# Altium footprint library Module.PcbLib: 88 footprints (part 5 of 6)
Each footprint in its own frame and in the unit in brackets; x right, y up, seen from the top. Pads: shape width x height; smd on the part's side, far side on the other; paste and mask are expansions set on the pad; w line width, h text height; cw(c..) or ccw(c..) is an arc to the next point about the centre after c.
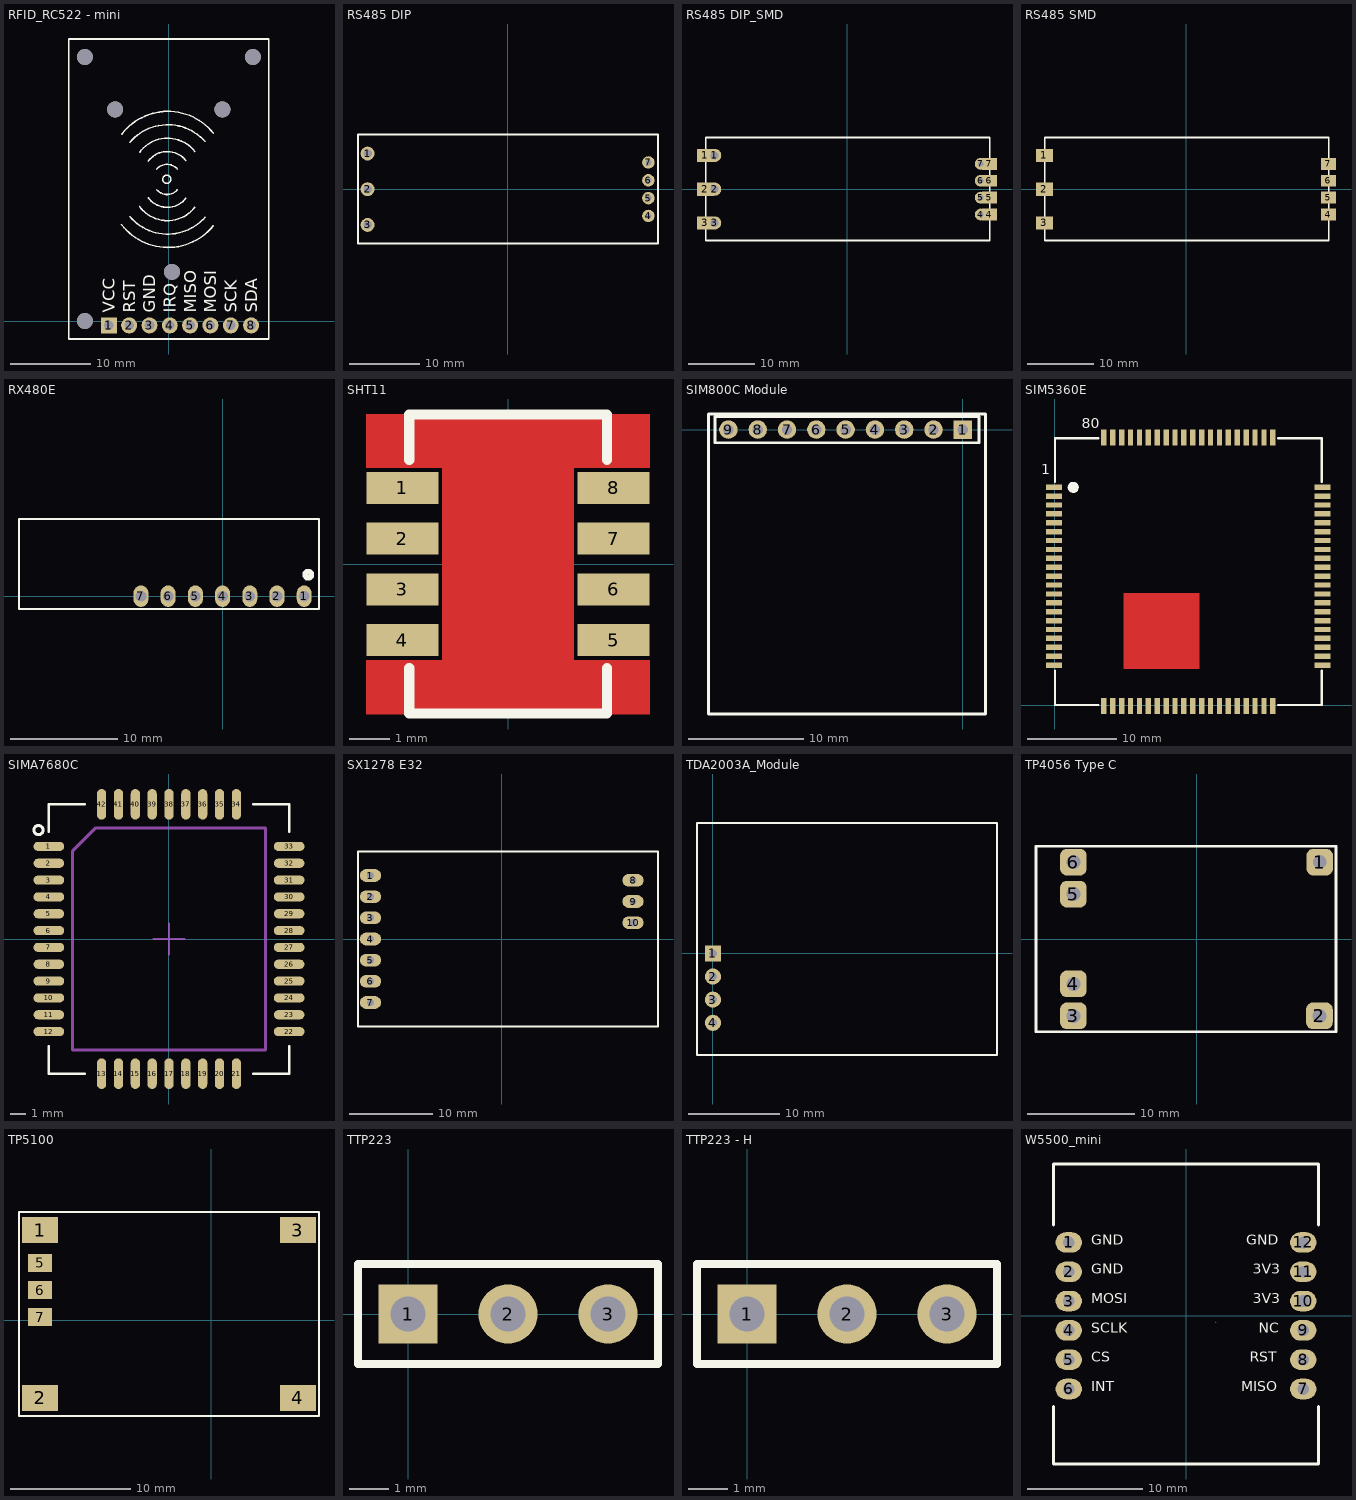
[diagram p4: the footprints below, top view; thin cyan lines are the x and y axes]

## RFID_RC522 - mini [mm] "RFID module header RC522 mini"
pads (14):
  rect 2x2 hole 1.2: 1(-7.46,-0.5)
  round 2 hole 1.2: 2(-4.92,-0.5) 3(-2.38,-0.5) 4(0.16,-0.5) 5(2.7,-0.5) 6(5.24,-0.5) 7(7.78,-0.5) 8(10.32,-0.5)
  round 2 hole 2: ""(-10.47,0.05) ""(-10.47,33.05) ""(-6.67,26.5) ""(0.43,6.2) ""(6.73,26.5) ""(10.53,33.05)
Top Overlay:
  circle w0.2: c-0.214,17.763 r0.508
  lines w0.2: -5.872,12.105 ccw(c-0.076,16.534) 5.599,11.95 ; -5.868,23.388 cw(c-0.072,18.959) 5.603,23.543 ; -4.824,13.095 ccw(c-0.092,17.123) 4.553,12.996 ; -4.819,22.397 cw(c-0.088,18.37) 4.557,22.497 ; -3.62,14.357 ccw(c-0.129,16.933) 3.288,14.261 ; -3.615,21.135 cw(c-0.125,18.559) 3.292,21.232 ; -2.527,15.45 ccw(c-0.156,17.217) 2.165,15.384 ; -2.523,20.043 cw(c-0.151,18.275) 2.169,20.109 ; -1.496,16.481 ccw(c-0.179,17.567) 1.106,16.442 ; -1.492,19.012 cw(c-0.174,17.925) 1.11,19.05 ; -12.47,-2.2 -12.47,35.3 12.53,35.3 12.53,-2.2 -12.47,-2.2
  text "VCC" at -6.716,1.056 h1.52
  text "RST" at -4.176,1.056 h1.52
  text "GND" at -1.636,1.056 h1.52
  text "IRQ" at 0.904,1.056 h1.52
  text "MISO" at 3.444,1.056 h1.52
  text "MOSI" at 5.984,1.056 h1.52
  text "SCK" at 8.524,1.056 h1.52
  text "SDA" at 11.064,1.056 h1.52
Top Designator:
  text ".Designator" at -3.681,16.206 h1.52
3D body "NFC-Reader.SLDPRT": height 5.6, standoff 4.4, extent -12.5,-2 12.5,35

## RS485 DIP [mil]
pads (7):
  round 78 hole 47: 1(-787.4,200) 2(-787.4,0) 3(-787.4,-200)
  round 70 hole 34: 4(787.4,-150) 5(787.4,-50) 6(787.4,50) 7(787.4,150)
Top Overlay:
  lines w10: -841.17,-303.88 841.6,-303.88 841.6,306.12 -841.17,306.12 -841.17,-303.88
Top Designator:
  text ".Designator" at -145.89,-12.43 h60
3D body "RS485.step": height 122.09, standoff 15.3, extent -841.17,-303 832.06,307.24
3D body: height 30.71, standoff 0, extent -841.17,-302.99 832.06,307.24

## RS485 DIP_SMD [mil]
pads (14):
  rect 100x78 smd: 1(-840.61,200) 2(-840.61,0) 3(-840.61,-200)
  round 78 hole 47: 1(-785.85,200) 2(-785.85,0) 3(-785.85,-200)
  round 70 hole 34: 4(788.96,-150) 5(788.96,-50) 6(788.96,50) 7(788.96,150)
  rect 90x70 smd: 4(840.61,-150) 5(840.61,-50) 6(840.61,50) 7(840.61,150)
Top Overlay:
  lines w10: -839.62,-303.88 -839.62,306.12 843.15,306.12 843.15,-303.88 -839.62,-303.88
Top Designator:
  text ".Designator" at -148.6,-12.43 h60
3D body: height 30.71, standoff 0, extent -839.61,-302.99 833.61,307.24
3D body "RS485.step": height 122.09, standoff 15.3, extent -839.62,-303 833.61,307.24

## RS485 SMD [mil]
pads (7):
  rect 100x78 smd: 1(-840.61,200) 2(-840.61,0) 3(-840.61,-200)
  rect 90x70 smd: 4(840.61,-150) 5(840.61,-50) 6(840.61,50) 7(840.61,150)
Top Overlay:
  lines w10: -839.62,-303.88 -839.62,306.12 843.15,306.12 843.15,-303.88 -839.62,-303.88
Top Designator:
  text ".Designator" at -148.6,-12.43 h60
3D body: height 30.71, standoff 0, extent -839.61,-302.99 833.61,307.24
3D body "RS485.step": height 122.09, standoff 15.3, extent -839.62,-303 833.61,307.24

## RX480E [mm]
pads (7):
  oval 1.4x2 hole 1 mask+0.1: 1(7.62,0) 2(5.08,0) 3(2.54,0) 4(0,0) 5(-2.54,0) 6(-5.08,0) 7(-7.62,0)
Top Overlay:
  circle w0.5: c8,2 r0.3
  lines w0.2: -19,-1.2 9,-1.2 9,7.2 -19,7.2 -19,-1.2
Top Designator:
  text ".Designator" at -8.711,3.023 h1.52
3D body "PLS-1R.step": height 3.3, standoff -5.32, extent -8.89,-0.415 -6.35,8.035
3D body "PLS-1R.step": height 3.3, standoff -5.32, extent -6.35,-0.415 -3.81,8.035
3D body "PLS-1R.step": height 3.3, standoff -5.32, extent -3.81,-0.415 -1.27,8.035
3D body "PLS-1R.step": height 3.3, standoff -5.32, extent -1.27,-0.415 1.27,8.035
3D body "PLS-1R.step": height 3.3, standoff -5.32, extent 1.27,-0.415 3.81,8.035
3D body "PLS-1R.step": height 3.3, standoff -5.32, extent 3.81,-0.415 6.35,8.035
3D body "PLS-1R.step": height 3.3, standoff -5.32, extent 6.35,-0.415 8.89,8.035
3D body "RX480E-4.STEP": height 13.05, standoff 0.75, extent -19,0.65 9,6.24

## SHT11 [mm]
pads (8):
  rect 1.8x0.8 smd mask+0.102: 1(-2.64,1.905) 2(-2.64,0.635) 3(-2.64,-0.635) 4(-2.64,-1.905) 5(2.64,-1.905) 6(2.64,-0.635) 7(2.64,0.635) 8(2.64,1.905)
Top Layer:
  pour cut-out: -3.54,3.75 3.54,3.75 3.54,2.407 3.539,2.409 1.64,2.409 1.639,2.408 1.639,-2.407 3.54,-2.407 3.54,-3.75 -3.54,-3.75 -3.543,-3.747 -3.543,-2.41 -1.643,-2.41 -1.64,-2.407 -1.64,2.41 -3.538,2.41 -3.539,2.411
Top Overlay:
  lines w0.254: -2.47,-2.599 -2.47,-3.735 2.47,-3.735 2.47,-2.599 ; -2.47,2.599 -2.47,3.735 2.47,3.735 2.47,2.599
Top Designator:
  text ".Designator" at -3.711,-0.344 h1.52

## SIM800C Module [mm]
pads (9):
  rect 1.6x1.6 hole 0.9: 1(0,0)
  round 1.6 hole 0.9: 2(-2.54,0) 3(-5.08,0) 4(-7.62,0) 5(-10.16,0) 6(-12.7,0) 7(-15.24,0) 8(-17.78,0) 9(-20.32,0)
Top Overlay:
  lines w0.254: -22.042,-24.651 1.959,-24.651 1.959,1.349 -22.042,1.349 -22.042,-24.651 ; -21.463,-1.143 1.38,-1.143 1.38,1.143 -21.463,1.143 -21.463,-1.143
Top Designator:
  text ".Designator" at -13.752,-11.995 h1.52
3D body "HEADER 2.54X9.stp": height 13, standoff 1.8, extent -21.463,-1.235 1.397,1.263
3D body "User Library-SIM800C-1.STEP": height 13.97, standoff 11.63, extent -18.87,-17.883 -1.27,-2.183
3D body "Header-F-2.54X9.stp": height 8.6, standoff -3.1, extent -21.715,-1.24 1.395,1.26
3D body: height 11.6, standoff 10, extent -22.098,-24.651 2.032,1.27

## SIM5360E [mm]
pads (82):
  rect 1.8x0.6 smd mask+0.102: 1(-0.1,24.5) 2(-0.1,23.5) 3(-0.1,22.5) 4(-0.1,21.5) 5(-0.1,20.5) 6(-0.1,19.5) 7(-0.1,18.5) 8(-0.1,17.5) 9(-0.1,16.5) 10(-0.1,15.5) 11(-0.1,14.5) 12(-0.1,13.5) 13(-0.1,12.5) 14(-0.1,11.5) 15(-0.1,10.5) 16(-0.1,9.5) 17(-0.1,8.5) 18(-0.1,7.5) 19(-0.1,6.5) 20(-0.1,5.5) 41(30.1,5.5) 42(30.1,6.5) 43(30.1,7.5) 44(30.1,8.5) 45(30.1,9.5) 46(30.1,10.5) 47(30.1,11.5) 48(30.1,12.5) 49(30.1,13.5) 50(30.1,14.5) 51(30.1,15.5) 52(30.1,16.5) 53(30.1,17.5) 54(30.1,18.5) 55(30.1,19.5) 56(30.1,20.5) 57(30.1,21.5) 58(30.1,22.5) 59(30.1,23.5) 60(30.1,24.5) 81(-0.1,4.5) 82(30.1,4.5)
  rect 0.6x1.8 smd mask+0.102: 21(5.5,-0.1) 22(6.5,-0.1) 23(7.5,-0.1) 24(8.5,-0.1) 25(9.5,-0.1) 26(10.5,-0.1) 27(11.5,-0.1) 28(12.5,-0.1) 29(13.5,-0.1) 30(14.5,-0.1) 31(15.5,-0.1) 32(16.5,-0.1) 33(17.5,-0.1) 34(18.5,-0.1) 35(19.5,-0.1) 36(20.5,-0.1) 37(21.5,-0.1) 38(22.5,-0.1) 39(23.5,-0.1) 40(24.5,-0.1) 61(24.5,30.1) 62(23.5,30.1) 63(22.5,30.1) 64(21.5,30.1) 65(20.5,30.1) 66(19.5,30.1) 67(18.5,30.1) 68(17.5,30.1) 69(16.5,30.1) 70(15.5,30.1) 71(14.5,30.1) 72(13.5,30.1) 73(12.5,30.1) 74(11.5,30.1) 75(10.5,30.1) 76(9.5,30.1) 77(8.5,30.1) 78(7.5,30.1) 79(6.5,30.1) 80(5.5,30.1)
Top Layer:
  pour cut-out: 7.75,12.6 16.25,12.6 16.25,4.1 7.75,4.1
Top Overlay:
  circle w0.254: c2.057,24.486 r0.5
  region: 2.057,23.986 1.958,23.986 1.774,24.062 1.634,24.202 1.557,24.386 1.557,24.486 1.557,24.585 1.634,24.769 1.774,24.909 1.958,24.986 2.057,24.986 2.157,24.986 2.341,24.909 2.481,24.769 2.557,24.585 2.557,24.486 2.557,24.386 2.481,24.202 2.341,24.062 2.157,23.986
  lines w0.254: 0,3.9 0,0 4.9,0 ; 0,25.1 0,30 4.9,30 ; 25.1,0 30,0 30,3.9 ; 25.1,30 30,30 30,25.1
  text "1" at -1.525,25.552 h2
  text "80" at 2.997,30.732 h2
Top Designator:
  text ".Designator" at 11.077,15.116 h1.52
3D body "User Library-sim5360_as_pcba_181113.step": height 2.95, standoff 0.05, extent 0.013,-0.002 30.013,29.998

## SIMA7680C [mm]
pads (42):
  oval 2x0.6 smd: 1(-7.85,6.05) 2(-7.85,4.95) 3(-7.85,3.85) 4(-7.85,2.75) 5(-7.85,1.65) 6(-7.85,0.55) 7(-7.85,-0.55) 8(-7.85,-1.65) 9(-7.85,-2.75) 10(-7.85,-3.85) 11(-7.85,-4.95) 12(-7.85,-6.05) 22(7.85,-6.05) 23(7.85,-4.95) 24(7.85,-3.85) 25(7.85,-2.75) 26(7.85,-1.65) 27(7.85,-0.55) 28(7.85,0.55) 29(7.85,1.65) 30(7.85,2.75) 31(7.85,3.85) 32(7.85,4.95) 33(7.85,6.05)
  oval 0.6x2 smd: 13(-4.4,-8.8) 14(-3.3,-8.8) 15(-2.2,-8.8) 16(-1.1,-8.8) 17(0,-8.8) 18(1.1,-8.8) 19(2.2,-8.8) 20(3.3,-8.8) 21(4.4,-8.8) 34(4.4,8.8) 35(3.3,8.8) 36(2.2,8.8) 37(1.1,8.8) 38(0,8.8) 39(-1.1,8.8) 40(-2.2,8.8) 41(-3.3,8.8) 42(-4.4,8.8)
Top Overlay:
  circle w0.2: c-8.528,7.118 r0.3
  lines w0.15: -7.85,-7 -7.85,-8.8 -5.5,-8.8 ; -7.85,7 -7.85,8.8 -5.5,8.8 ; 5.5,-8.8 7.85,-8.8 7.85,-7 ; 5.5,8.8 7.85,8.8 7.85,7
Top Designator:
  text ".Designator" at -3.711,-0.344 h1.52
Mechanical 12:
  text ".Designator" at -4.869,-0.452 h2
Mechanical 13:
  lines w0.15: -1,0 1,0 ; 0,-1 0,1
Mechanical 15:
  lines w0.2: -6.315,-7.265 -6.315,5.73 -4.78,7.265 6.315,7.265 6.315,-7.265 -6.315,-7.265
3D body "User Library-SIM800C-2.STEP": height 3.11, standoff 0.01, extent -7.85,-8.8 7.85,8.8

## SX1278 E32 [mil]
pads (10):
  oval 100x60 hole 35: 1(-620.08,300) 2(-620.08,200) 3(-620.08,100) 4(-620.08,0) 5(-620.08,-100) 6(-620.08,-200) 7(-620.08,-300) 8(620.08,277.17) 9(620.08,177.17) 10(620.08,77.17)
Top Overlay:
  lines w10: -679.13,-413.39 738.19,-413.39 738.19,413.39 -679.13,413.39 -679.13,-413.39
Top Designator:
  text ".Designator" at 126.63,-13.55 h60
Mechanical 12:
  text ".Designator" at -287.52,-26.67 h118.11
3D body "E32-433T20DT.stp": height 476.19, standoff -60.03, extent -679.86,-414.39 1229.59,412.38
3D body "05_ HEADER-3WAY-1ROW-2.54MM-VERTICAL-PCB.SLDPRT": height 386.96, standoff -67.92, extent -670.08,-50 -570.08,250
3D body "HEADER-1WAY-1ROW-2.54MM-VERTICAL-PCB.SLDPRT": height 386.22, standoff -68.11, extent -670.07,250 -570.07,350
3D body "05_ HEADER-3WAY-1ROW-2.54MM-VERTICAL-PCB.SLDPRT": height 386.96, standoff -67.92, extent -670.08,-350 -570.08,-50
3D body "05_ HEADER-3WAY-1ROW-2.54MM-VERTICAL-PCB.SLDPRT": height 386.96, standoff -67.92, extent 570.49,27.62 670.49,327.62

## TDA2003A_Module [mil] "TDA2003A module"
pads (4):
  rect 70x70 hole 34: 1(0,0)
  round 70 hole 34: 2(0,-100) 3(0,-200) 4(0,-300)
Top Overlay:
  lines w7.87: -69,-439.54 1228.74,-439.54 1228.74,564.4 -69,564.4 -69,-439.54
Top Designator:
  text ".Designator" at 435.51,100.95 h60
3D body "PCB1.step": height 1034.25, standoff -322.9, extent -49.01,-447 1236.15,676
3D body: height 40, standoff 0, extent -49,-447 1236.15,565

## TP4056 Type C [mm]
pads (6):
  rrect50% 2.5x2.5 hole 1.3: 1(11.544,7.201) 2(11.519,-7.201) 3(-11.544,-7.201) 4(-11.544,-4.204) 5(-11.544,4.204) 6(-11.544,7.201)
Top Overlay:
  lines w0.254: -15.05,-8.7 13.068,-8.7 13.068,8.701 -15.05,8.701 -15.05,-8.7
Top Designator:
  text ".Designator" at -4.174,-0.344 h1.52
Mechanical 12:
  text ".Designator" at -5.864,-0.451 h2
3D body "TP4056_Charging_Module_Type_C.step": height 4.64, standoff 0.5, extent -15.05,-8.687 14.25,8.713

## TP5100 [mm] "MODULE"
pads (7):
  rect 3x2.2 smd: 1(-14.25,7.5) 2(-14.25,-6.5) 3(7.25,7.5) 4(7.25,-6.5)
  rect 2x1.5 smd: 5(-14.25,4.75) 6(-14.25,2.5) 7(-14.25,0.25)
Top Overlay:
  lines w0.178: -16,-8 9,-8 9,9 -16,9 -16,-8
Top Designator:
  text ".Designator" at -3.711,-0.344 h1.52
3D body "tp5100 v2 (step).step": height 4.94, standoff 0.4, extent -16,-8 9,9

## TTP223 [mm] "Connector; Header; 3 Position"
pads (3):
  rect 1.5x1.5 hole 0.9: 1(0,0)
  round 1.5 hole 0.9: 2(2.54,0) 3(5.08,0)
Top Overlay:
  lines w0.2: -1.27,-1.27 -1.27,1.27 ; -1.27,-1.27 6.35,-1.27 6.35,1.27 -1.27,1.27 ; -1.27,-1.27 -1.27,1.27
Top Designator:
  text ".Designator" at -1.171,5.56 h1.52
3D body "touch button TTP223.STEP": height 1, standoff -1, extent -2.71,-1.321 7.79,13.179

## TTP223 - H [mm] "Connector; Header; 3 Position"
pads (3):
  rect 1.5x1.5 hole 0.9: 1(0,0)
  round 1.5 hole 0.9: 2(2.54,0) 3(5.08,0)
Top Overlay:
  lines w0.2: -1.27,-1.27 -1.27,1.27 ; -1.27,-1.27 6.35,-1.27 6.35,1.27 -1.27,1.27 ; -1.27,-1.27 -1.27,1.27
Top Designator:
  text ".Designator" at -1.018,3.341 h1.52
3D body "TTP223 Button Module.step": height 14.55, standoff -5.67, extent -2.808,-0.331 8.192,8.739

## W5500_mini [mil]
pads (12):
  oval 90x70 hole 40: 1(-400,250) 2(-400,150) 3(-400,50) 4(-400,-50) 5(-400,-150) 6(-400,-250) 7(400,-250) 8(400,-150) 9(400,-50) 10(400,50) 11(400,150) 12(400,250)
Top Overlay:
  lines w10: -452.76,-309.06 -452.76,-505.91 452.76,-505.91 452.76,-309.06 ; -452.76,309.06 -452.76,517.72 452.76,517.72 452.76,309.06
  text "GND" at 205.33,230.78 h60
  text "3V3" at 228.21,131.03 h60
  text "RST" at 217.08,-169.22 h60
  text "NC" at 248.57,-69.25 h60
  text "3V3" at 228.21,31.02 h60
  text "MISO" at 188.17,-269.23 h60
  text "MOSI" at -324.03,30.77 h60
  text "SCLK" at -324.05,-69.22 h60
  text "CS" at -324.05,-169.22 h60
  text "INT" at -324.04,-269.23 h60
  text "GND" at -324.09,130.78 h60
  text "GND" at -324.09,230.78 h60
Top Designator:
  text ".Designator" at -146.1,-54.3 h60
Mechanical 15:
  lines w0.1: 101.6,-21.9 103.6,-19.9
3D body "W5500 mini Module.STEP": height 708.66, standoff -247.64, extent -452.76,-478.35 452.76,588.58